# Altium footprint library 2019-09-10_14-26-32.PcbLib: 3 footprints
Each footprint in its own frame and in the unit in brackets; x right, y up, seen from the top. Pads: shape width x height; smd on the part's side, far side on the other; paste and mask are expansions set on the pad; w line width, h text height; cw(c..) or ccw(c..) is an arc to the next point about the centre after c.
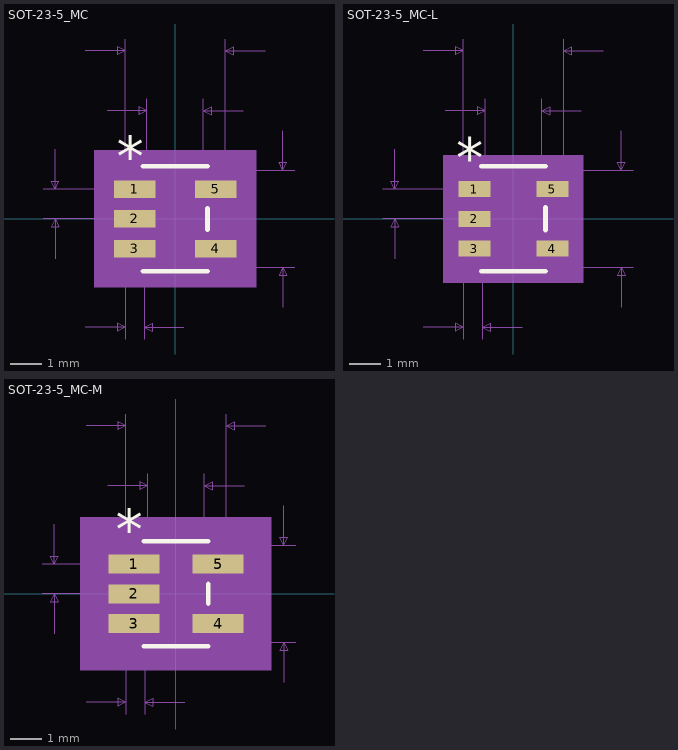
[diagram p0: the footprints below, top view; thin cyan lines are the x and y axes]

## SOT-23-5_MC [mil]
pads (5):
  rect 52x22 smd paste+0 mask+0: 1(-51,37.4) 2(-51,0) 3(-51,-37.4) 4(51,-37.4) 5(51,37.4)
Top Overlay:
  lines w6: -40.5,-66 40.5,-66 ; -40.5,66 40.5,66 ; 40.5,-13.3 40.5,13.3
  text "*" at -73.5,54.4 h50
Mechanical 5:
  region: 102,-86 -102,-86 -102,86 102,86
Mechanical 7:
  lines w1: -166,0 -51,0 ; -166,37.4 -51,37.4 ; -151,-50 -151,0 ; -151,87.4 -151,37.4 ; -113,-136 -63,-136 ; -113,211 -63,211 ; -85.5,136 -35.5,136 ; -63,-151 -63,0 -63,226 ; -39,-151 -39,0 ; -35.5,0 -35.5,151 ; 0,-61 150.5,-61 ; 0,61 150.5,61 ; 11,-136 -39,-136 ; 35.5,0 35.5,151 ; 63,0 63,226 ; 85.5,136 35.5,136 ; 113,211 63,211 ; 135.5,-111 135.5,-61 ; 135.5,111 135.5,61 ; -151,0 -156,-10 -146,-10 -151,0 ; -151,37.4 -156,47.4 -146,47.4 -151,37.4 ; -63,-136 -73,-131 -73,-141 -63,-136 ; -63,211 -73,216 -73,206 -63,211 ; -39,-136 -29,-131 -29,-141 -39,-136 ; -35.5,136 -45.5,141 -45.5,131 -35.5,136 ; 35.5,136 45.5,141 45.5,131 35.5,136 ; 63,211 73,216 73,206 63,211 ; 135.5,-61 130.5,-71 140.5,-71 135.5,-61 ; 135.5,61 130.5,71 140.5,71 135.5,61
  text "Default Padstyle: RX52Y22D0T" at -350,-261 h50
  text "Pin 1 Padstyle: RX52Y22D0T" at -325,-321 h50
  text "Alt 1 Padstyle: OX60Y90D30P" at -337.5,-501 h50
  text "Alt 2 Padstyle: OX90Y60D30P" at -337.5,-561 h50
  text "0.071in/1.803mm" at -93.75,156 h25
  text "0.126in/3.2mm" at -81.25,231 h25
  text "0.122in/3.099mm" at 155.5,-12.5 h25
  text "0.037in/0.95mm" at -346,6.2 h25
  text "0.024in/0.61mm" at -138.5,-181 h25
Mechanical 13:
  lines w0: -12,61 ccw(c0,61) 12,61
  lines w1: -63,-47.4 -63,-27.4 -35.5,-27.4 -35.5,-47.4 -63,-47.4 ; -63,-10 -63,10 -35.5,10 -35.5,-10 -63,-10 ; -63,27.4 -63,47.4 -35.5,47.4 -35.5,27.4 -63,27.4 ; -35.5,-61 35.5,-61 35.5,61 -35.5,61 -35.5,-61 ; 35.5,-47.4 35.5,-27.4 63,-27.4 63,-47.4 35.5,-47.4 ; 35.5,27.4 35.5,47.4 63,47.4 63,27.4 35.5,27.4
  text "*" at -38,16.4 h50
Mechanical 15:
  region: 45.5,-71 -45.5,-71 -45.5,-58.4 -87,-58.4 -87,58.4 -45.5,58.4 -45.5,71 45.5,71 45.5,58.4 87,58.4 87,-58.4 45.5,-58.4
  lines w6: -87,-58.4 -45.5,-58.4 -45.5,-71 45.5,-71 45.5,-58.4 87,-58.4 87,58.4 45.5,58.4 45.5,71 -45.5,71 -45.5,58.4 -87,58.4 -87,-58.4
3D body: height 10, standoff 0, extent 0,0 10,10

## SOT-23-5_MC-L [mil]
pads (5):
  rect 40x20 smd paste+0 mask+0: 1(-49,37.4) 2(-49,0) 3(-49,-37.4) 4(49,-37.4) 5(49,37.4)
Top Overlay:
  lines w6: -40.5,-66 40.5,-66 ; -40.5,66 40.5,66 ; 40.5,-14.3 40.5,14.3
  text "*" at -71.5,52.4 h50
Mechanical 5:
  region: 88,-80 -88,-80 -88,80 88,80
Mechanical 7:
  lines w1: -164,0 -49,0 ; -164,37.4 -49,37.4 ; -149,-50 -149,0 ; -149,87.4 -149,37.4 ; -113,-136 -63,-136 ; -113,211 -63,211 ; -85.5,136 -35.5,136 ; -63,-151 -63,0 -63,226 ; -39,-151 -39,0 ; -35.5,0 -35.5,151 ; 0,-61 150.5,-61 ; 0,61 150.5,61 ; 11,-136 -39,-136 ; 35.5,0 35.5,151 ; 63,0 63,226 ; 85.5,136 35.5,136 ; 113,211 63,211 ; 135.5,-111 135.5,-61 ; 135.5,111 135.5,61 ; -149,0 -154,-10 -144,-10 -149,0 ; -149,37.4 -154,47.4 -144,47.4 -149,37.4 ; -63,-136 -73,-131 -73,-141 -63,-136 ; -63,211 -73,216 -73,206 -63,211 ; -39,-136 -29,-131 -29,-141 -39,-136 ; -35.5,136 -45.5,141 -45.5,131 -35.5,136 ; 35.5,136 45.5,141 45.5,131 35.5,136 ; 63,211 73,216 73,206 63,211 ; 135.5,-61 130.5,-71 140.5,-71 135.5,-61 ; 135.5,61 130.5,71 140.5,71 135.5,61
  text "Default Padstyle: RX40Y20D0T" at -350,-261 h50
  text "Pin 1 Padstyle: RX40Y20D0T" at -325,-321 h50
  text "Alt 1 Padstyle: OX60Y90D30P" at -337.5,-501 h50
  text "Alt 2 Padstyle: OX90Y60D30P" at -337.5,-561 h50
  text "0.071in/1.803mm" at -93.75,156 h25
  text "0.126in/3.2mm" at -81.25,231 h25
  text "0.122in/3.099mm" at 155.5,-12.5 h25
  text "0.037in/0.95mm" at -344,6.2 h25
  text "0.024in/0.61mm" at -138.5,-181 h25
Mechanical 13:
  lines w0: -12,61 ccw(c0,61) 12,61
  lines w1: -63,-47.4 -63,-27.4 -35.5,-27.4 -35.5,-47.4 -63,-47.4 ; -63,-10 -63,10 -35.5,10 -35.5,-10 -63,-10 ; -63,27.4 -63,47.4 -35.5,47.4 -35.5,27.4 -63,27.4 ; -35.5,-61 35.5,-61 35.5,61 -35.5,61 -35.5,-61 ; 35.5,-47.4 35.5,-27.4 63,-27.4 63,-47.4 35.5,-47.4 ; 35.5,27.4 35.5,47.4 63,47.4 63,27.4 35.5,27.4
  text "*" at -38,14.4 h50
Mechanical 15:
  region: 39.5,-65 -39.5,-65 -39.5,-51.4 -73,-51.4 -73,51.4 -39.5,51.4 -39.5,65 39.5,65 39.5,51.4 73,51.4 73,-51.4 39.5,-51.4
  lines w6: -73,-51.4 -39.5,-51.4 -39.5,-65 39.5,-65 39.5,-51.4 73,-51.4 73,51.4 39.5,51.4 39.5,65 -39.5,65 -39.5,51.4 -73,51.4 -73,-51.4
3D body: height 10, standoff 0, extent 0,0 10,10

## SOT-23-5_MC-M [mil]
pads (5):
  rect 64x24 smd paste+0 mask+0: 1(-53,37.4) 2(-53,0) 3(-53,-37.4) 4(53,-37.4) 5(53,37.4)
Top Overlay:
  lines w6: -40.5,-66 40.5,-66 ; -40.5,66 40.5,66 ; 40.5,-12.3 40.5,12.3
  text "*" at -75.5,56.4 h50
Mechanical 5:
  region: 120,-96 -120,-96 -120,96 120,96
Mechanical 7:
  lines w1: -168,0 -53,0 ; -168,37.4 -53,37.4 ; -153,-50 -153,0 ; -153,87.4 -153,37.4 ; -113,-136 -63,-136 ; -113,211 -63,211 ; -85.5,136 -35.5,136 ; -63,-151 -63,0 -63,226 ; -39,-151 -39,0 ; -35.5,0 -35.5,151 ; 0,-61 150.5,-61 ; 0,61 150.5,61 ; 11,-136 -39,-136 ; 35.5,0 35.5,151 ; 63,0 63,226 ; 85.5,136 35.5,136 ; 113,211 63,211 ; 135.5,-111 135.5,-61 ; 135.5,111 135.5,61 ; -153,0 -158,-10 -148,-10 -153,0 ; -153,37.4 -158,47.4 -148,47.4 -153,37.4 ; -63,-136 -73,-131 -73,-141 -63,-136 ; -63,211 -73,216 -73,206 -63,211 ; -39,-136 -29,-131 -29,-141 -39,-136 ; -35.5,136 -45.5,141 -45.5,131 -35.5,136 ; 35.5,136 45.5,141 45.5,131 35.5,136 ; 63,211 73,216 73,206 63,211 ; 135.5,-61 130.5,-71 140.5,-71 135.5,-61 ; 135.5,61 130.5,71 140.5,71 135.5,61
  text "Default Padstyle: RX64Y24D0T" at -350,-261 h50
  text "Pin 1 Padstyle: RX64Y24D0T" at -325,-321 h50
  text "Alt 1 Padstyle: OX60Y90D30P" at -337.5,-501 h50
  text "Alt 2 Padstyle: OX90Y60D30P" at -337.5,-561 h50
  text "0.071in/1.803mm" at -93.75,156 h25
  text "0.126in/3.2mm" at -81.25,231 h25
  text "0.122in/3.099mm" at 155.5,-12.5 h25
  text "0.037in/0.95mm" at -348,6.2 h25
  text "0.024in/0.61mm" at -138.5,-181 h25
Mechanical 13:
  lines w0: -12,61 ccw(c0,61) 12,61
  lines w1: -63,-47.4 -63,-27.4 -35.5,-27.4 -35.5,-47.4 -63,-47.4 ; -63,-10 -63,10 -35.5,10 -35.5,-10 -63,-10 ; -63,27.4 -63,47.4 -35.5,47.4 -35.5,27.4 -63,27.4 ; -35.5,-61 35.5,-61 35.5,61 -35.5,61 -35.5,-61 ; 35.5,-47.4 35.5,-27.4 63,-27.4 63,-47.4 35.5,-47.4 ; 35.5,27.4 35.5,47.4 63,47.4 63,27.4 35.5,27.4
  text "*" at -38,18.4 h50
Mechanical 15:
  region: 55.5,-81 -55.5,-81 -55.5,-69.4 -105,-69.4 -105,69.4 -55.5,69.4 -55.5,81 55.5,81 55.5,69.4 105,69.4 105,-69.4 55.5,-69.4
  lines w6: -105,-69.4 -55.5,-69.4 -55.5,-81 55.5,-81 55.5,-69.4 105,-69.4 105,69.4 55.5,69.4 55.5,81 -55.5,81 -55.5,69.4 -105,69.4 -105,-69.4
3D body: height 10, standoff 0, extent 0,0 10,10